# Altium schematic symbol library AT42QT1011-MAHR.SchLib: 1 symbol
Pins are listed as number, name and electrical type; pins without a type are passive.

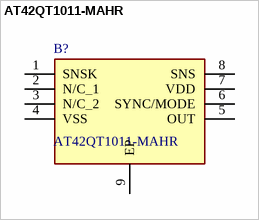
[diagram p0: symbol AT42QT1011-MAHR]

## AT42QT1011-MAHR
designator B?
MICROCHIP - AT42QT1011-MAHR - CAPACITIVE TOUCH SENSOR, 1 CH, UDFN-8; Geometry.Height: 0.6mm; Mouser Part Number: 556-AT42QT1011-MAHR; Mouser Price/Stock: https://www.mouser.co.uk/ProductDetail/Microchip-Technology/AT42QT1011-MAHR?qs=YCa%2FAAYMW03Z9vaJZZjHhQ%3D%3D; Manufacturer_Name: Microchip; Manufacturer_Part_Number: AT42QT1011-MAHR; Datasheet Link: http://ww1.microchip.com/downloads/en/DeviceDoc/40001947A.pdf
footprint SON50P200X200X60-9N
pins: 1 SNSK, 2 N/C_1, 3 N/C_2, 4 VSS, 5 OUT, 6 SYNC/MODE, 7 VDD, 8 SNS, 9 EP